# Altium footprint library Thunderscope_Rev5.3.PcbLib: 68 footprints (part 1 of 5)
Each footprint in its own frame and in the unit in brackets; x right, y up, seen from the top. Pads: shape width x height; smd on the part's side, far side on the other; paste and mask are expansions set on the pad; w line width, h text height; cw(c..) or ccw(c..) is an arc to the next point about the centre after c.
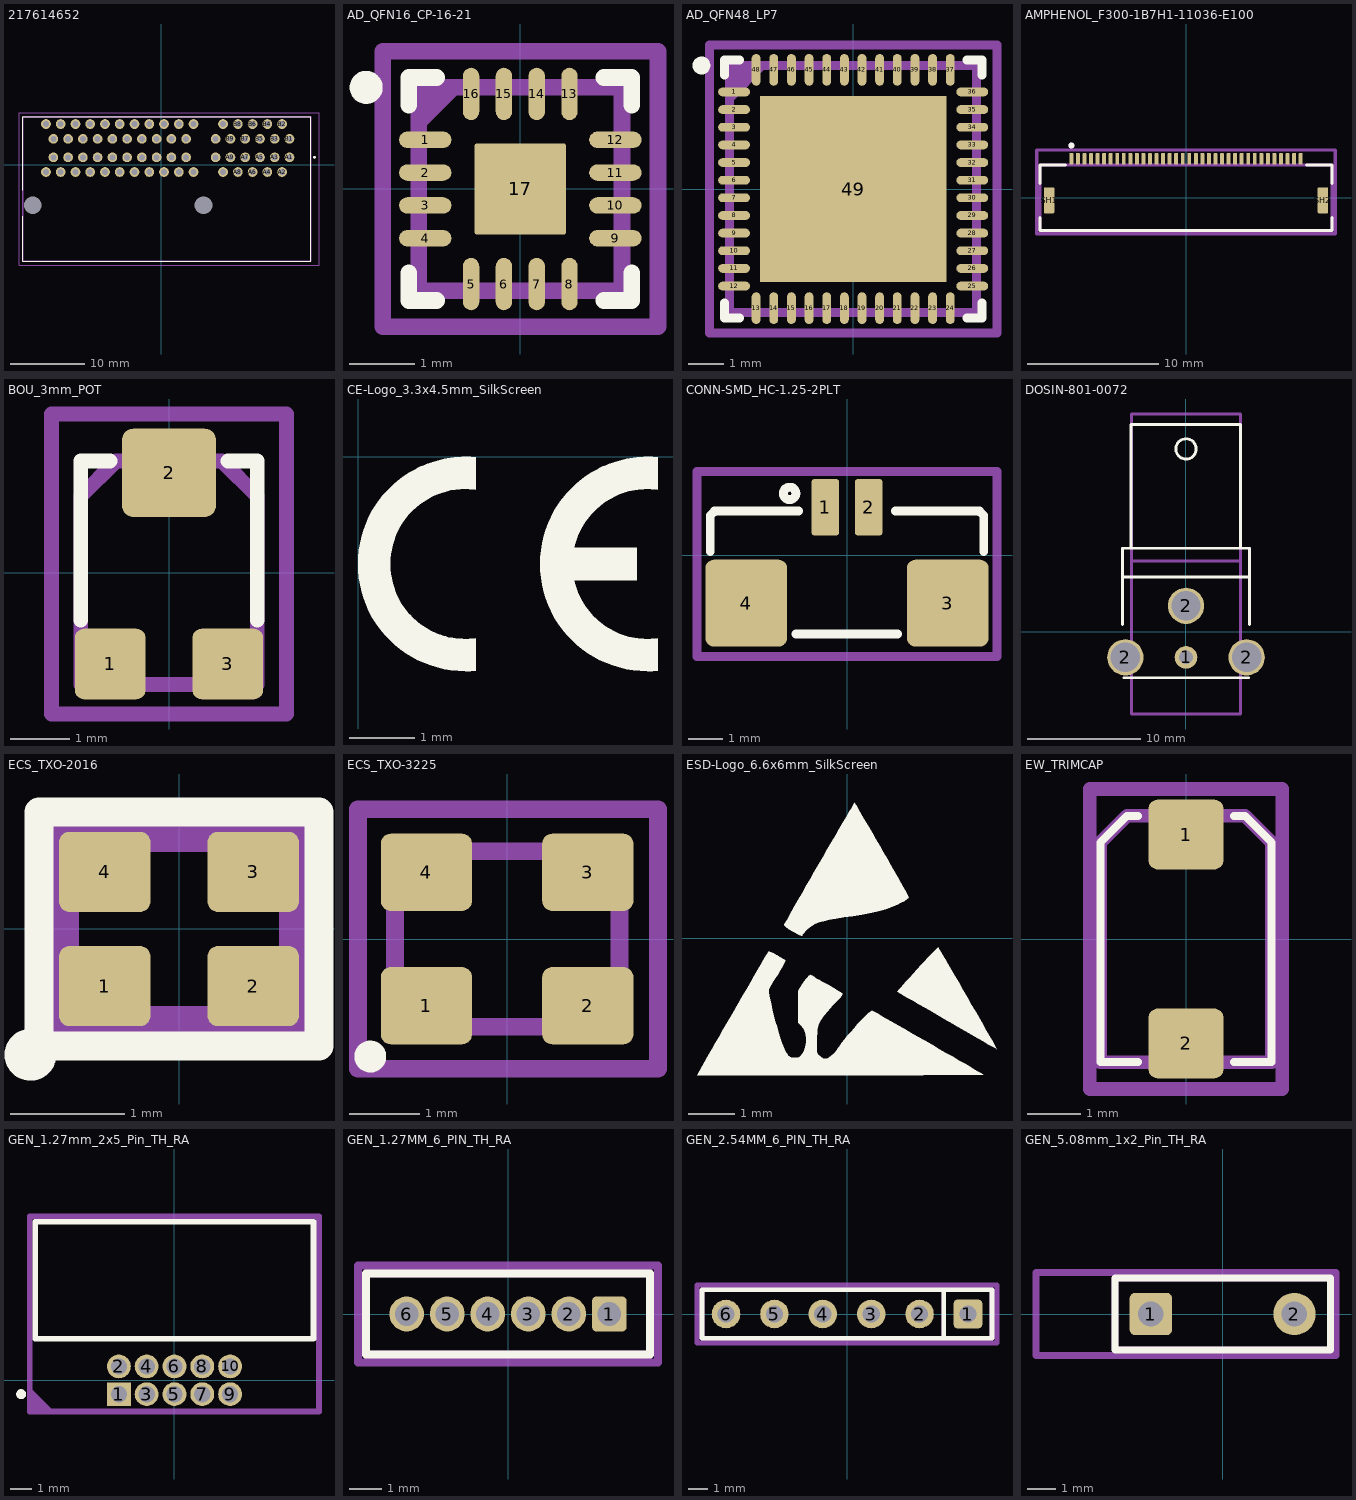
[diagram p0: the footprints below, top view; thin cyan lines are the x and y axes]

## 217614652 [mm]
pads (66):
  round 1.316 hole 0.81: A1(17.4,1) A2(16.4,-1) A3(15.4,1) A4(14.4,-1) A5(13.4,1) A6(12.4,-1) A7(11.4,1) A8(10.4,-1) A9(9.4,1) A10(8.4,-1) A11(7.4,1) A12(4.4,-1) A13(3.4,1) A14(2.4,-1) A15(1.4,1) A16(0.4,-1) A17(-0.6,1) A18(-1.6,-1) A19(-2.6,1) A20(-3.6,-1) A21(-4.6,1) A22(-5.6,-1) A23(-6.6,1) A24(-7.6,-1) A25(-8.6,1) A26(-9.6,-1) A27(-10.6,1) A28(-11.6,-1) A29(-12.6,1) A30(-13.6,-1) A31(-14.6,1) A32(-15.6,-1) B1(17.4,3.5) B2(16.4,5.5) B3(15.4,3.5) B4(14.4,5.5) B5(13.4,3.5) B6(12.4,5.5) B7(11.4,3.5) B8(10.4,5.5) B9(9.4,3.5) B10(8.4,5.5) B11(7.4,3.5) B12(4.4,5.5) B13(3.4,3.5) B14(2.4,5.5) B15(1.4,3.5) B16(0.4,5.5) B17(-0.6,3.5) B18(-1.6,5.5) B19(-2.6,3.5) B20(-3.6,5.5) B21(-4.6,3.5) B22(-5.6,5.5) B23(-6.6,3.5) B24(-7.6,5.5) B25(-8.6,3.5) B26(-9.6,5.5) B27(-10.6,3.5) B28(-11.6,5.5) B29(-12.6,3.5) B30(-13.6,5.5) B31(-14.6,3.5) B32(-15.6,5.5)
  round 1.2 hole 2.4 unplated: MH1(5.75,-5.5) MH2(-17.4,-5.5)
Top Overlay:
  lines w0.1: -18.75,-7 -18.75,-13.1 20.25,-13.1 20.25,6.5 -18.75,6.5 -18.75,-3.5
  lines w0.2: 20.8,0.9 cw(c20.8,1) 20.8,1.1 cw(c20.8,1) 20.8,0.9
Mechanical 1:
  lines w0.1: -19.25,-13.6 21.4,-13.6 21.4,7 -19.25,7 -19.25,-13.6
Mechanical 13:
  lines w0.2: -18.75,-13.1 20.25,-13.1 20.25,6.5 -18.75,6.5 -18.75,-13.1
3D body "2-1761465-2.stp": height 9.23, standoff -4.57, extent -18.63,-13.1 20.37,6.5

## AD_QFN16_CP-16-21 [mm]
pads (17):
  rrect100% 0.8x0.25 smd mask+0: 1(-1.45,0.75) 2(-1.45,0.25) 3(-1.45,-0.25) 4(-1.45,-0.75) 9(1.45,-0.75) 10(1.45,-0.25) 11(1.45,0.25) 12(1.45,0.75)
  rrect100% 0.25x0.8 smd mask+0: 5(-0.75,-1.45) 6(-0.25,-1.45) 7(0.25,-1.45) 8(0.75,-1.45) 13(0.75,1.45) 14(0.25,1.45) 15(-0.25,1.45) 16(-0.75,1.45)
  rrect5% 1.392x1.392 smd paste-0.1 mask+0: 17(0,0)
Top Overlay:
  circle w0.254: c-2.35,1.55 r0.125
  lines w0.254: -1.7,-1.275 -1.7,-1.7 -1.275,-1.7 ; -1.7,1.275 -1.7,1.7 -1.275,1.7 ; 1.275,-1.7 1.7,-1.7 1.7,-1.275 ; 1.275,1.7 1.7,1.7 1.7,1.275
Mechanical 5:
  lines w0.254: -2.1,-2.1 -2.1,2.1 2.1,2.1 2.1,-2.1 -2.1,-2.1
Mechanical 6:
  region: -1.55,0.85 -1.55,1.55 -0.85,1.55
  lines w0.254: -1.55,-1.55 1.55,-1.55 1.55,1.55 -1.55,1.55 -1.55,-1.55
  text "'.Designator'" at 0.166,-0.396 h0.5
3D body "LFCSP-16-1EP_3x3mm_P0.5mm_EP1.3x1.3mm (1).step": height 0.76, standoff 0, extent -1.5,-1.5 1.5,1.5

## AD_QFN48_LP7 [mm]
pads (49):
  rrect100% 0.9x0.25 smd mask+0: 1(-3.375,2.75) 2(-3.375,2.25) 3(-3.375,1.75) 4(-3.375,1.25) 5(-3.375,0.75) 6(-3.375,0.25) 7(-3.375,-0.25) 8(-3.375,-0.75) 9(-3.375,-1.25) 10(-3.375,-1.75) 11(-3.375,-2.25) 12(-3.375,-2.75) 25(3.375,-2.75) 26(3.375,-2.25) 27(3.375,-1.75) 28(3.375,-1.25) 29(3.375,-0.75) 30(3.375,-0.25) 31(3.375,0.25) 32(3.375,0.75) 33(3.375,1.25) 34(3.375,1.75) 35(3.375,2.25) 36(3.375,2.75)
  rrect100% 0.25x0.9 smd mask+0: 13(-2.75,-3.375) 14(-2.25,-3.375) 15(-1.75,-3.375) 16(-1.25,-3.375) 17(-0.75,-3.375) 18(-0.25,-3.375) 19(0.25,-3.375) 20(0.75,-3.375) 21(1.25,-3.375) 22(1.75,-3.375) 23(2.25,-3.375) 24(2.75,-3.375) 37(2.75,3.375) 38(2.25,3.375) 39(1.75,3.375) 40(1.25,3.375) 41(0.75,3.375) 42(0.25,3.375) 43(-0.25,3.375) 44(-0.75,3.375) 45(-1.25,3.375) 46(-1.75,3.375) 47(-2.25,3.375) 48(-2.75,3.375)
  rect 5.28x5.28 smd paste-5.28 mask+0: 49(0,0)
Top Overlay:
  circle w0.254: c-4.3,3.5 r0.125
  lines w0.254: -3.65,-3.225 -3.65,-3.65 -3.225,-3.65 ; -3.65,3.225 -3.65,3.65 -3.225,3.65 ; 3.225,-3.65 3.65,-3.65 3.65,-3.225 ; 3.225,3.65 3.65,3.65 3.65,3.225
Top Paste:
  lines w0.254: -2.575,-2.575 -1.025,-2.575 -1.025,-1.025 -2.575,-1.025 -2.575,-2.575 ; -2.575,-0.775 -1.025,-0.775 -1.025,0.775 -2.575,0.775 -2.575,-0.775 ; -2.575,1.025 -1.025,1.025 -1.025,2.575 -2.575,2.575 -2.575,1.025 ; -0.775,-2.575 0.775,-2.575 0.775,-1.025 -0.775,-1.025 -0.775,-2.575 ; -0.775,-0.775 0.775,-0.775 0.775,0.775 -0.775,0.775 -0.775,-0.775 ; -0.775,1.025 0.775,1.025 0.775,2.575 -0.775,2.575 -0.775,1.025 ; 1.025,-2.575 2.575,-2.575 2.575,-1.025 1.025,-1.025 1.025,-2.575 ; 1.025,-0.775 2.575,-0.775 2.575,0.775 1.025,0.775 1.025,-0.775 ; 1.025,1.025 2.575,1.025 2.575,2.575 1.025,2.575 1.025,1.025
Mechanical 5:
  lines w0.254: -4.075,-4.075 4.075,-4.075 4.075,4.075 -4.075,4.075 -4.075,-4.075
Mechanical 6:
  region: -3.5,2.4 -3.5,3.5 -2.4,3.5
  lines w0.254: -3.5,-3.5 -3.5,3.5 3.5,3.5 3.5,-3.5 -3.5,-3.5
  text "'.Designator'" at -0.282,-0.282 h1
3D body "AD_QFN48_LP7.step": height 1, standoff 0, extent -3.501,-3.501 3.501,3.501

## AMPHENOL_F300-1B7H1-11036-E100 [mm]
pads (38):
  rrect25% 0.3x0.85 smd mask+0: 1(-8.75,2.975) 2(-8.25,2.975) 3(-7.75,2.975) 4(-7.25,2.975) 5(-6.75,2.975) 6(-6.25,2.975) 7(-5.75,2.975) 8(-5.25,2.975) 9(-4.75,2.975) 10(-4.25,2.975) 11(-3.75,2.975) 12(-3.25,2.975) 13(-2.75,2.975) 14(-2.25,2.975) 15(-1.75,2.975) 16(-1.25,2.975) 17(-0.75,2.975) 18(-0.25,2.975) 19(0.25,2.975) 20(0.75,2.975) 21(1.25,2.975) 22(1.75,2.975) 23(2.25,2.975) 24(2.75,2.975) 25(3.25,2.975) 26(3.75,2.975) 27(4.25,2.975) 28(4.75,2.975) 29(5.25,2.975) 30(5.75,2.975) 31(6.25,2.975) 32(6.75,2.975) 33(7.25,2.975) 34(7.75,2.975) 35(8.25,2.975) 36(8.75,2.975)
  rrect25% 0.8x2 smd mask+0: SH1(-10.45,-0.2) SH2(10.45,-0.2)
Top Overlay:
  circle w0.254: c-8.75,3.985 r0.1
  lines w0.254: -11.15,-1.515 -11.15,-2.5 11.15,-2.5 11.15,-1.515 ; -11.15,1.115 -11.15,2.5 -9.215,2.5 ; 9.215,2.5 11.15,2.5 11.15,1.115
Mechanical 5:
  lines w0.254: -11.4,-2.75 11.4,-2.75 11.4,3.65 -11.4,3.65 -11.4,-2.75
Mechanical 6:
  circle w0.254: c-8.75,3.985 r0.1
  lines w0.254: -11.15,-2.5 11.15,-2.5 11.15,2.5 -11.15,2.5 -11.15,-2.5
  text "'.Designator'" at -0.354,-0.545 h1.5
3D body "F300-1B7H1-11036-E100.step": height 2, standoff 0, extent -11.15,-2.5 11.15,3.2

## BOU_3mm_POT [mm]
pads (3):
  rrect25% 1.2x1.2 smd mask+0: 1(-1,-1.55) 3(1,-1.55)
  rrect25% 1.6x1.5 smd mask+0: 2(0,1.7)
Top Overlay:
  lines w0.254: -1.5,-0.8 -1.5,1.9 -1,1.9 ; 1,1.9 1.5,1.9 1.5,-0.8
Mechanical 5:
  lines w0.254: -2,-2.4 -2,2.7 2,2.7 2,-2.4 -2,-2.4
Mechanical 6:
  lines w0.254: -1.5,-1.9 -1.5,1.3 -0.9,1.9 0.9,1.9 1.5,1.3 1.5,-1.9 -1.5,-1.9
  text "'.Designator'" at -0.166,0.538 h0.5
3D body "TC-33X-2.step": height 1.13, standoff -0.02, extent -1.8,-1.913 1.8,2.05

## CE-Logo_3.3x4.5mm_SilkScreen [mm]
Top Overlay:
  drawing of 2 lines, arcs and shapes, not listed

## CONN-SMD_HC-1.25-2PLT [mm]
pads (4):
  rrect20% 0.8x1.62 smd paste+0 mask+0.05: 1(-0.625,1.38) 2(0.625,1.38)
  rrect20% 2.35x2.5 smd paste+0 mask+0.05: 3(2.9,-1.38) 4(-2.9,-1.38)
Top Overlay:
  circle w0.254: c-1.651,1.778 r0.18
  lines w0.254: -3.937,0.101 -3.937,1.143 -3.81,1.27 -1.397,1.27 ; -1.47,-2.27 1.451,-2.27 ; 1.397,1.27 3.81,1.27 3.937,1.143 3.937,0.101
Mechanical 5:
  lines w0.254: -4.318,-2.921 4.318,-2.921 4.318,2.413 -4.318,2.413 -4.318,-2.921
Mechanical 6:
  lines w0.254: -4.318,-2.921 -4.318,2.413 4.318,2.413 4.318,-2.921 -4.318,-2.921
  text "'.Designator'" at -0.194,-0.182 h0.5
3D body "CONN-SMD_HC-1.25-2PLT.step": height 4.7, standoff -0.01, extent -3.65,-2.15 3.65,2.15

## DOSIN-801-0072 [mm]
pads (4):
  round 2 hole 1.2 mask+0: 1(0,-2.275)
  round 3.2 hole 2.6 mask+0: 2(-5.35,-2.275) 2(0,2.275) 2(5.35,-2.275)
Top Overlay:
  circle w0.254: c0,16.118 r0.898
  lines w0.254: -5.588,0.624 -5.588,7.355 5.588,7.355 5.588,0.624 ; -5.588,4.799 5.588,4.799 ; -5.461,-4.075 5.539,-4.075 ; -4.865,7.355 -4.865,18.277 4.826,18.277 4.826,7.355
Mechanical 5:
  lines w0.254: -4.8,-7.275 -4.8,6.225 4.8,6.225 4.8,-7.275 -4.8,-7.275
Mechanical 6:
  lines w0.254: -4.8,-7.275 4.8,-7.275 4.8,19.2 -4.8,19.2 -4.8,-7.275
  text "'.Designator'" at 0.361,0.532 h1
3D body "BNC-TH_DOSIN-801-0072.step": height 11.9, standoff -4.3, extent -5.5,-3.55 5.5,18.95

## ECS_TXO-2016 [mm]
pads (4):
  rrect25% 0.8x0.7 smd mask+0: 1(-0.65,-0.5) 2(0.65,-0.5) 3(0.65,0.5) 4(-0.65,0.5)
Top Overlay:
  circle w0.254: c-1.3,-1.1 r0.1
  lines w0.254: -1.225,-1.025 1.225,-1.025 1.225,1.025 -1.225,1.025 -1.225,-1.025
Mechanical 5:
  lines w0.254: -1.2,-1 1.2,-1 1.2,1 -1.2,1 -1.2,-1
Mechanical 6:
  region: -0.3,-0.8 -1,-0.8 -1,-0.1
  lines w0.254: -1,-0.8 1,-0.8 1,0.8 -1,0.8 -1,-0.8
  text "'.Designator'" at 0.103,0.112 h0.4
3D body "ECS-TXO-2016-33-250-TR.step": height 0.8, standoff 0, extent -1,-0.8 1,0.8

## ECS_TXO-3225 [mm]
pads (4):
  rrect25% 1.3x1.1 smd mask+0: 1(-1.15,-0.95) 2(1.15,-0.95) 3(1.15,0.95) 4(-1.15,0.95)
Top Overlay:
  circle w0.254: c-1.95,-1.675 r0.1
Mechanical 5:
  lines w0.254: -2.125,-1.85 -2.125,1.85 2.15,1.85 2.15,-1.85 -2.125,-1.85
Mechanical 6:
  region: -0.9,-1.25 -1.6,-1.25 -1.6,-0.55
  lines w0.254: -1.6,-1.25 -1.6,1.25 1.6,1.25 1.6,-1.25 -1.6,-1.25
  text "'.Designator'" at 0.11,0.139 h0.5
3D body "ECS-TXO-3225MV-100-TR.step": height 1.2, standoff 0, extent -1.6,-1.25 1.6,1.25

## ESD-Logo_6.6x6mm_SilkScreen [mm]
Top Overlay:
  drawing of 3 lines, arcs and shapes, not listed

## EW_TRIMCAP [mm]
pads (2):
  rrect25% 1.4x1.3 smd mask+0: 1(0,1.95) 2(0,-1.95)
Top Overlay:
  lines w0.15: -0.9,-2.3 -1.6,-2.3 -1.6,1.6 -1.6,1.8 -1.1,2.3 -0.9,2.3 ; 0.9,-2.3 1.6,-2.3 1.6,1.8 1.1,2.3 0.9,2.3
Mechanical 5:
  lines w0.254: -1.8,-2.8 -1.8,2.8 1.8,2.8 1.8,-2.8 -1.8,-2.8
Mechanical 6:
  lines w0.254: -1.6,-2.3 0.9,-2.3 1.6,-2.3 1.6,1.8 1.1,2.3 0.9,2.3 -1.1,2.3 -1.6,1.8 -1.6,1.6 -1.6,-2.3
  text "'.Designator'" at 0.166,-0.537 h0.5
3D body "JZ300 (1).step": height 1.45, standoff -0.01, extent -1.6,-2.25 1.6,2.25

## GEN_1.27mm_2x5_Pin_TH_RA [mm]
pads (10):
  rect 1.09x1.09 hole 0.74 mask+0: 1(-2.54,-0.635)
  round 1.09 hole 0.74 mask+0: 2(-2.54,0.635) 3(-1.27,-0.635) 4(-1.27,0.635) 5(0,-0.635) 6(0,0.635) 7(1.27,-0.635) 8(1.27,0.635) 9(2.54,-0.635) 10(2.54,0.635)
Top Overlay:
  circle w0.254: c-7,-0.635 r0.1
  lines w0.254: -6.35,1.905 6.35,1.905 6.35,7.235 -6.35,7.235 -6.35,1.905
Mechanical 5:
  lines w0.254: -6.6,-1.43 6.6,-1.43 6.6,7.485 -6.6,7.485 -6.6,-1.43
Mechanical 6:
  region: -5.5,-1.425 -6.6,-1.425 -6.6,-0.325
  lines w0.254: -6.6,-1.425 -6.6,7.475 6.6,7.475 6.6,-1.425 -6.6,-1.425
  text "'.Designator'" at -0.223,-0.364 h1
3D body "SHF-105-01-L-D-RA (1).step": height 3.39, standoff -4.36, extent -6.35,-0.889 6.35,7.188

## GEN_1.27MM_6_PIN_TH_RA [mm]
pads (6):
  rrect25% 1.09x1.09 hole 0.74 mask+0: 1(3.175,0)
  round 1.09 hole 0.74 mask+0: 2(1.905,0) 3(0.635,0) 4(-0.635,0) 5(-1.905,0) 6(-3.175,0)
Top Overlay:
  lines w0.254: -4.445,-1.27 4.445,-1.27 4.445,1.27 -4.445,1.27 -4.445,-1.27
Mechanical 4:
  lines w0.254: -4.699,-1.524 4.699,-1.524 4.699,1.524 -4.699,1.524 -4.699,-1.524
Mechanical 7:
  lines w0.254: -4.445,-1.27 4.445,-1.27 4.445,1.27 -4.445,1.27 -4.445,-1.27
  text "'.Designator'" at 0,0 h1

## GEN_2.54MM_6_PIN_TH_RA [mm]
pads (6):
  rrect25% 1.5x1.5 hole 0.9 mask+0: 1(6.35,0)
  round 1.5 hole 0.9 mask+0: 2(3.81,0) 3(1.27,0) 4(-1.27,0) 5(-3.81,0) 6(-6.35,0)
Top Overlay:
  lines w0.254: 5.08,-1.27 5.08,1.27 ; -7.62,-1.27 -7.62,1.27 7.62,1.27 7.62,-1.27 -7.62,-1.27
Mechanical 4:
  lines w0.254: -7.874,-1.524 -7.874,1.524 7.874,1.524 7.874,-1.524 -7.874,-1.524
Mechanical 7:
  lines w0.254: 5.08,-1.27 5.08,1.27 ; -7.62,-1.27 -7.62,1.27 7.62,1.27 7.62,-1.27 -7.62,-1.27
  text "'.Designator'" at -0.228,-0.361 h1

## GEN_5.08mm_1x2_Pin_TH_RA [mm]
pads (2):
  rrect25% 1.5x1.5 hole 0.9 mask+0: 1(-2.54,0)
  round 1.5 hole 0.9 mask+0: 2(2.54,0)
Top Overlay:
  lines w0.254: -3.81,-1.27 -3.81,1.27 3.81,1.27 3.81,-1.27 -3.81,-1.27
Mechanical 5:
  lines w0.254: -6.604,-1.47 -6.604,1.47 4.01,1.47 4.01,-1.47 -6.604,-1.47
Mechanical 6:
  lines w0.254: -3.81,-1.27 3.81,-1.27 3.81,1.27 -3.81,1.27 -3.81,-1.27
  text "'.Designator'" at -0.235,-0.364 h1
3D body "TSW-101-16-G-Q-RA (1).step": height 8.14, standoff -5.07, extent -14.732,-1.27 2.857,1.27